# EAGLE library part CON-DIP6 (library madhu)
6 pin DIP connector
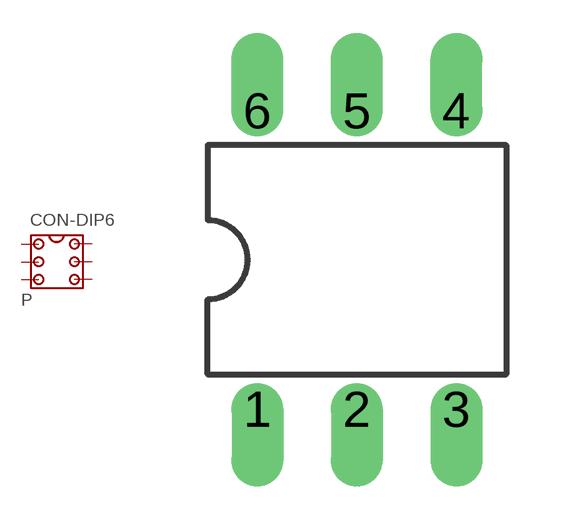
[diagram p0: symbol with the pads of DIL06; footprint DIL06]

Designator prefix P

## CON-DIP6  [DIL06]
1  1  pas
2  2  pas
3  3  pas
4  4  pas
5  5  pas
6  6  pas

## Footprint DIL06 (pad centres in mm)
Dual In Line Package
drill 0.813 offset: 1 -2.54,-3.81; 2 0,-3.81; 3 2.54,-3.81; 4 2.54,3.81; 5 0,3.81; 6 -2.54,3.81